# Altium footprint library Connectors.PcbLib: 319 footprints (part 5 of 20)
Each footprint in its own frame and in the unit in brackets; x right, y up, seen from the top. Pads: shape width x height; smd on the part's side, far side on the other; paste and mask are expansions set on the pad; w line width, h text height; cw(c..) or ccw(c..) is an arc to the next point about the centre after c.
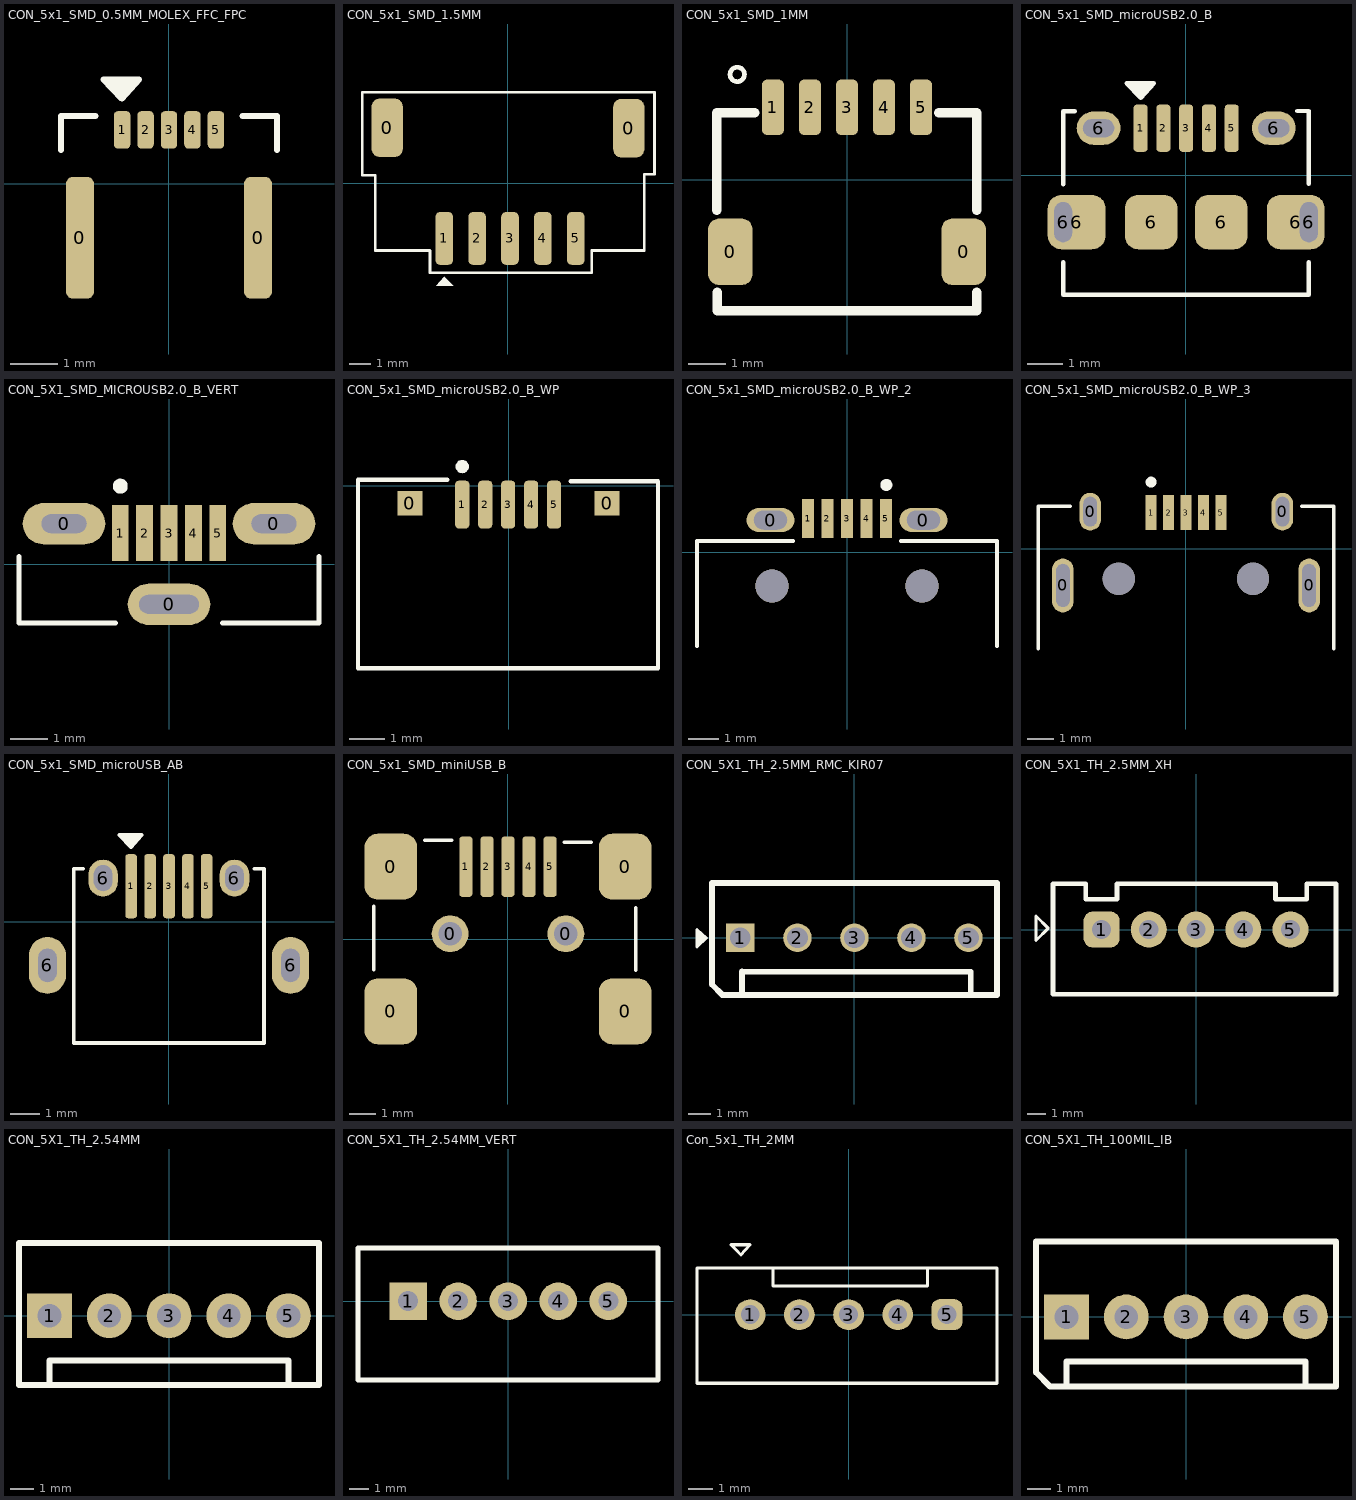
[diagram p4: the footprints below, top view; thin cyan lines are the x and y axes]

## CON_5x1_SMD_0.5MM_MOLEX_FFC_FPC [mm] "/ 20190222 / C-A.Serna.A"
pads (7):
  rrect50% 0.6x2.6 smd: 0(-1.9,-1.15) 0(1.9,-1.15)
  rrect50% 0.35x0.8 smd: 1(-1,1.15) 2(-0.5,1.15) 3(0,1.15) 4(0.5,1.15) 5(1,1.15)
Top Overlay:
  region: -0.638,2.23 -1.4,2.23 -1.005,1.816
  lines w0.127: -2.3,0.718 -2.3,1.45 -1.568,1.45 ; 1.568,1.45 2.3,1.45 2.3,0.718 ; -1.4,2.23 -1.005,1.816 -0.638,2.23 -1.4,2.23
3D body "512810594.stp": height 1.22, standoff 0.02, extent -2.3,-2.6 2.3,1.45

## CON_5x1_SMD_1.5MM [mil] "/20201006/J-E.Pachon"
pads (7):
  rrect50% 55.87x105 smd: 0(-216.87,99.41) 0(216.87,98.74)
  rrect50% 31.5x94.49 smd: 1(-114.51,-99.41) 2(-55.45,-99.41) 3(3.61,-99.41) 4(62.66,-99.41) 5(121.71,-99.41)
Top Overlay:
  region: -128.67,-184.31 -98.67,-184.31 -114.23,-168
  lines w5: -261.86,13.96 -238.24,13.96 -238.24,-121.06 -139.82,-121.06 -139.82,-161.1 150.33,-161.1 150.33,-121.06 244.82,-121.06 244.82,15.96 263.33,15.96 263.33,163.19 -261.86,163.19 -261.86,13.96
3D body "5025840570.stp": height 280.03, standoff -7.37, extent -231.16,-135.51 233.41,155.83

## CON_5x1_SMD_1MM [mm] "/20200422/V-A.Patino"
pads (7):
  rrect50% 1.2x1.8 smd: 0(-3.15,-1.95) 0(3.15,-1.95)
  rrect50% 0.6x1.5 smd: 1(-2,1.95) 2(-1,1.95) 3(0,1.95) 4(1,1.95) 5(2,1.95)
Top Overlay:
  lines w0.127: -2.969,3.033 ccw(c-2.963,2.838) -2.963,3.034
  lines w0.254: -3.515,-0.831 -3.515,1.8 -2.491,1.8 ; -3.5,-3.043 -3.5,-3.544 3.5,-3.544 3.5,-3.043 ; 2.476,1.8 3.5,1.8 3.5,-0.831
3D body "5015680507.stp": height 3.21, standoff 0.01, extent -3.5,-3.544 3.5,2.356

## CON_5x1_SMD_microUSB2.0_B [mm] "/ 20191206/ C-D Viveros"
pads (13):
  rrect50% 0.4x1.35 smd: 1(-1.295,1.34) 2(-0.645,1.34) 3(0.005,1.34) 4(0.655,1.34) 5(1.305,1.34)
  oval 0.889x1.549 hole 1.143 slot 0.508 at 0 deg: 6(-3.505,-1.34) 6(3.505,-1.34)
  rrect50% 1.65x1.55 smd: 6(-3.12,-1.34) 6(3.13,-1.34)
  oval 1.25x0.95 hole 0.889 slot 0.508 at 90 deg: 6(-2.495,1.34) 6(2.505,1.34)
  rrect50% 1.5x1.55 smd: 6(-0.995,-1.34) 6(1.005,-1.34)
Top Overlay:
  region: -0.924,2.62 -1.686,2.62 -1.291,2.206
  lines w0.127: -3.505,-2.49 -3.505,-3.41 3.505,-3.41 3.505,-2.48 ; -3.505,-0.26 -3.505,1.82 -3.178,1.82 ; 3.178,1.83 3.505,1.83 3.505,-0.25 ; -1.686,2.62 -0.924,2.62 -1.291,2.206 -1.686,2.62
3D body "10118194c.stp": height 2.71, standoff -0.56, extent -4.01,-4.04 4.04,1.54

## CON_5X1_SMD_MICROUSB2.0_B_VERT [mm] "20220117 / E.Naranjo"
pads (8):
  oval 2.2x1.1 hole 0.5 slot 1.2 at 0 deg: 0(-2.8,1.075) 0(2.8,1.075)
  oval 2.2x1.1 hole 0.5 slot 1.6 at 0 deg: 0(0,-1.075)
  rect 0.45x1.5 smd: 1(-1.3,0.825) 2(-0.65,0.825) 3(0,0.825) 4(0.65,0.825) 5(1.3,0.825)
Top Overlay:
  circle w0.2: c-1.3,2.075 r0.1
  lines w0.127: -4,0.205 -4,-1.575 -1.42,-1.575 ; 1.42,-1.575 4,-1.575 4,0.205
3D body "105133-0001--3DModel-STEP-1.STEP": height 6.71, standoff -2.29, extent -4.049,-1.625 3.951,1.39

## CON_5x1_SMD_microUSB2.0_B_WP [mm] "/20210105/J-E.Pachon"
pads (8):
  rect 0.7x0.7 smd: 0(-2.79,-0.498) 0(2.79,-0.498)
  rrect50% 0.4x1.35 smd: 1(-1.31,-0.538) 2(-0.66,-0.538) 3(-0.01,-0.538) 4(0.64,-0.538) 5(1.29,-0.538)
  round 0.381 on Top Overlay: ""(-1.31,0.538)
Top Overlay:
  lines w0.127: -1.74,0.162 -4.26,0.162 -4.26,-5.168 4.23,-5.168 4.23,0.122 1.76,0.122
3D body "gmcba058xx1230hhr.stp": height 3.77, standoff -0.03, extent -4.11,-5.088 4.09,0.012

## CON_5x1_SMD_microUSB2.0_B_WP_2 [mm] "/20210216/J-E.Pachon"
pads (9):
  oval 1.6x0.8 hole 0.635 slot 1.1 at 0 deg: 0(-2.55,1.075) 0(2.55,1.075)
  rect 0.4x1.3 smd: 1(-1.3,1.125) 2(-0.65,1.125) 3(0,1.125) 4(0.65,1.125) 5(1.3,1.125)
  round 1.1 hole 1.1 unplated: ""(-2.5,-1.125) ""(2.5,-1.125)
Top Overlay:
  circle w0.2: c1.31,2.245 r0.1
  lines w0.127: -5,-3.125 -5,0.375 -1.8,0.375 ; 1.8,0.375 5,0.375 5,-3.125
3D body "CUI_DEVICES_UJ2-MIBH-4-SMT-TR-67.step": height 4.45, standoff -0.4, extent -5,-6.045 5,1.605

## CON_5x1_SMD_microUSB2.0_B_WP_3 [mm] "/20220223/J-E.Pachon"
pads (11):
  oval 0.8x2 hole 1.6 slot 0.5 at 0 deg: 0(-4.585,-1.375) 0(4.585,-1.375)
  oval 0.8x1.4 hole 1.1 slot 0.5 at 0 deg: 0(-3.567,1.375) 0(3.589,1.375)
  rect 0.4x1.3 smd: 1(-1.301,1.335) 2(-0.651,1.335) 3(-0.001,1.335) 4(0.649,1.335) 5(1.299,1.335)
  round 1.2 hole 1.2 unplated: ""(-2.501,-1.125) ""(2.499,-1.125)
Top Overlay:
  circle w0.2: c-1.301,2.475 r0.1
  lines w0.127: -5.501,-3.725 -5.501,1.575 -4.301,1.575 ; 4.299,1.575 5.499,1.575 5.499,-3.725
3D body "CWPC-R05RSG0-M1.stp": height 5.69, standoff -0.85, extent -5.388,-5.625 5.387,1.775

## CON_5x1_SMD_microUSB_AB [mm] "/ 20190222 / C-A.Serna.A"
pads (9):
  rrect50% 0.4x2.2 smd: 1(-1.3,1.219) 2(-0.65,1.219) 3(0,1.219) 4(0.65,1.219) 5(1.291,1.219)
  oval 1.27x1.956 hole 0.635 slot 1.143 at 90 deg: 6(-4.175,-1.499) 6(4.175,-1.499)
  oval 1.016x1.27 hole 0.635 slot 0.889 at 90 deg: 6(-2.265,1.499) 6(2.25,1.498)
Top Overlay:
  region: -0.939,2.98 -1.701,2.98 -1.306,2.566
  lines w0.127: -2.95,1.82 -3.277,1.82 -3.277,-4.166 3.226,-4.166 ; 2.935,1.82 3.261,1.82 3.261,-4.166 ; -1.701,2.98 -1.306,2.566 -0.939,2.98 -1.701,2.98
3D body "475890001.stp": height 2.75, standoff -0.56, extent -4.35,-4.166 4.3,1.728

## CON_5x1_SMD_miniUSB_B [mm] "20190328 / V-A.Patino"
pads (11):
  rrect50% 2x2.5 smd: 0(-4.45,-2.75) 0(-4.45,2.75) 0(4.45,-2.75) 0(4.45,2.75)
  round 1.4 hole 0.889: 0(-2.2,0.2) 0(2.2,0.2)
  rrect50% 0.5x2.3 smd: 1(-1.6,2.75) 2(-0.8,2.75) 3(0,2.75) 4(0.8,2.75) 5(1.6,2.75)
Top Overlay:
  lines w0.127: -5.105,-1.172 -5.105,1.241 ; -3.175,3.756 -2.134,3.756 ; 2.134,3.68 3.175,3.68 ; 4.851,-1.197 4.851,1.191
3D body "usb_a-usb_b-m5-smd-c.stp": height 4, standoff -0.93, extent -5.102,-5.596 4.798,3.654

## CON_5X1_TH_2.5MM_RMC_KIR07 [mm] "20221102 / E.Naranjo"
pads (5):
  rect 1.25x1.25 hole 0.9: 1(-5,0)
  round 1.25 hole 0.9: 2(-2.5,0) 3(0,0) 4(2.5,0) 5(5,0)
Top Overlay:
  region: -6.907,0.364 -6.907,-0.398 -6.493,-0.002
  lines w0.127: -6.907,-0.398 -6.907,0.364 -6.493,-0.002 -6.907,-0.398
  lines w0.254: -4.936,-2.5 -4.936,-1.475 ; -4.936,-1.485 5.098,-1.485 5.098,-2.5 ; -6.25,-2.05 -6.25,2.4 6.25,2.4 6.25,-2.5 -5.8,-2.5 -6.25,-2.05
3D body "171825-5.stp": height 10.41, standoff -3.59, extent -6.25,-2.5 6.25,2.4

## CON_5X1_TH_2.5MM_XH [mil] "/20201014/C-A.Serna.A"
height 385.83
pads (5):
  rrect50% 75x75 hole 40: 1(-196.85,0)
  round 75 hole 40: 2(-98.43,0) 3(0,0) 4(98.43,0) 5(196.85,0)
Top Overlay:
  lines w6: -333.66,-23.03 -308.07,2.56 -333.66,28.15 -333.66,-23.03
  lines w10: -298.43,-135.04 291.73,-135.04 291.73,95.67 230.79,95.67 230.79,63.15 165.79,63.15 165.79,95.67 -165,95.67 -165,63.15 -230,63.15 -230,95.67 -298.43,95.67 -298.43,-135.04
3D body "xhp-5.STEP": height 379.02, standoff 66.02, extent -299.29,-130.21 286.7,93.79
3D body "User Library-JST B5B-XH-A.STEP": height 276.09, standoff -133.36, extent -296.06,-131.3 290.55,95.08

## CON_5X1_TH_2.54MM [mil] "/20200110/V-A.Patino"
pads (5):
  rect 75x75 hole 40: 1(-200,0)
  round 75 hole 40: 2(-100,0) 3(0,0) 4(100,0) 5(200,0)
Top Overlay:
  lines w10: -200,-115.35 -200,-75 200,-75 200,-114.96 ; -251.18,-116.14 -251.18,122.05 251.18,122.05 251.18,-116.14 -251.18,-116.14
3D body "022272051.stp": height 461.13, standoff -139.65, extent -250,-114.17 250,114.17

## CON_5X1_TH_2.54MM_VERT [mil] "/20230123/J-E.Pachon"
pads (5):
  rect 75x75 hole 40: 1(-200,0)
  round 75 hole 40: 2(-100,0) 3(0,0) 4(100,0) 5(200,0)
Top Overlay:
  lines w10: -300,-157.48 -300,106.3 299.21,106.3 299.21,-157.48 -300,-157.48
3D body "705430039.stp": height 464.96, standoff -130.04, extent -300,-160 300,100

## Con_5x1_TH_2MM [mm] "/20210803/J-E.Pachon"
pads (5):
  round 1.25 hole 0.762: 1(-4,0) 2(-2,0) 3(0,0) 4(2,0)
  rrect50% 1.25x1.25 hole 0.762: 5(4,0)
Top Overlay:
  lines w0.127: -3.07,1.87 -3.07,1.16 3.2,1.16 3.2,1.89 ; -6.16,-2.79 6.03,-2.79 6.03,1.89 2.36,1.89 -6.16,1.89 -6.16,-2.79 ; -4.768,2.84 -4.006,2.84 -4.373,2.426 -4.768,2.84
3D body "B5B-PH-K-S.step": height 6, standoff -3.4, extent -5.91,-2.79 5.99,1.91

## CON_5X1_TH_100MIL_IB [mil] "/20200110/V-A.Patino"
pads (5):
  rect 75x75 hole 40: 1(-200,0)
  round 75 hole 40: 2(-100,0) 3(0,0) 4(100,0) 5(200,0)
Top Overlay:
  lines w10: -200,-115.35 -200,-75 200,-75 200,-114.96 ; -251.18,-92.91 -251.18,125.98 251.18,125.98 251.18,-116.14 -227.95,-116.14 -251.18,-92.91
3D body "022272051.stp": height 461.13, standoff -139.65, extent -251.18,-112.99 248.82,115.35